# Altium footprint library Terminal_Blocks_Pluggable PCB_5.08mm.PcbLib: 299 footprints (part 10 of 19)
Each footprint in its own frame and in the unit in brackets; x right, y up, seen from the top. Pads: shape width x height; smd on the part's side, far side on the other; paste and mask are expansions set on the pad; w line width, h text height; cw(c..) or ccw(c..) is an arc to the next point about the centre after c.
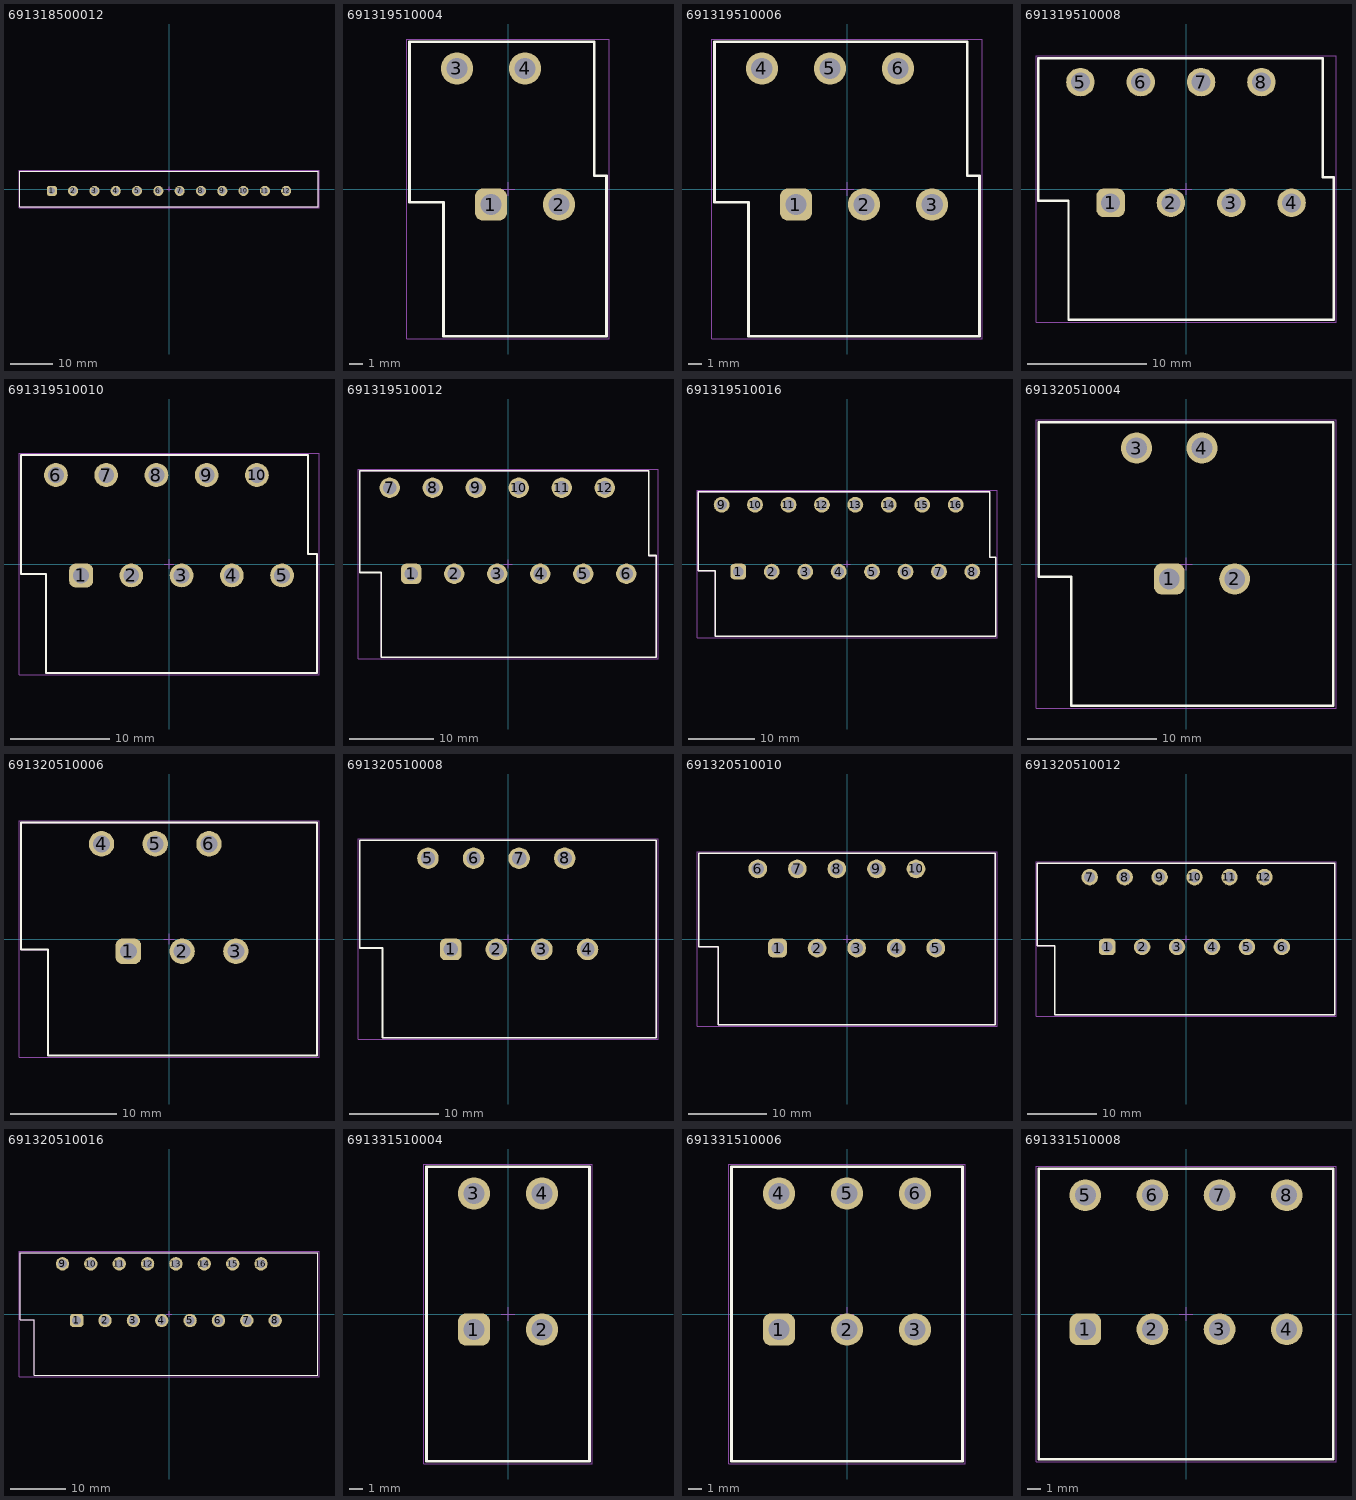
[diagram p9: the footprints below, top view; thin cyan lines are the x and y axes]

## 691318500012 [mm] "5,08mm - Closed Vertical PCB Header with Flanges - 12p"
height 12
pads (12):
  rrect50% 2.4x2.4 hole 1.6: 1(-27.94,-0.45)
  round 2.4 hole 1.6: 2(-22.86,-0.45) 3(-17.78,-0.45) 4(-12.7,-0.45) 5(-7.62,-0.45) 6(-2.54,-0.45) 7(2.54,-0.45) 8(7.62,-0.45) 9(12.7,-0.45) 10(17.78,-0.45) 11(22.86,-0.45) 12(27.94,-0.45)
Top Overlay:
  lines w0.2: -35.56,-4.25 -35.56,4.25 35.56,4.25 35.56,-4.25 -35.56,-4.25
Top Designator:
  text ".Designator" at -7.498,-0.5 h1.5
Top Component Outline:
  lines w0.1: -35.56,-4.25 35.56,-4.25 35.56,4.25 -35.56,4.25 -35.56,-4.25
Top 3D Body:
  lines w0.1: -35.56,-4.25 -35.56,4.25 35.56,4.25 35.56,-4.25 -35.56,-4.25
Top Courtyard:
  lines w0.05: -35.76,-4.45 -35.76,4.45 35.76,4.45 35.76,-4.45 -35.76,-4.45
Top Component Center:
  lines w0.05: -0.5,0 0.5,0 ; 0,-0.5 0,0.5
3D body "691318500012.stp": height 12.05, standoff -3.95, extent -35.56,-4.25 35.56,4.25

## 691319510004 [mm] "Double Level Horizontal Male PCB Header with closed Flanges, pitch 5.08mm, 04p"
height 23.7
pads (4):
  rrect50% 2.4x2.4 hole 1.6: 1(-1.27,-1.16)
  round 2.4 hole 1.6: 2(3.81,-1.16) 3(-3.81,9) 4(1.27,9)
Top Overlay:
  lines w0.2: -7.35,-1 -4.81,-1 -4.81,-11 7.35,-11 7.35,1 6.45,1 6.45,11 -7.35,11 -7.35,-1
Top Designator:
  text ".Designator" at -7.498,-0.5 h1.5
Top Component Outline:
  lines w0.1: -7.35,-1 -7.35,11 6.45,11 6.45,1 7.35,1 7.35,-11 -4.81,-11 -4.81,-1 -7.35,-1
Top 3D Body:
  lines w0.1: -7.35,-1 -4.81,-1 -4.81,-11 7.35,-11 7.35,1 6.45,1 6.45,11 -7.35,11 -7.35,-1
Top Courtyard:
  lines w0.05: -7.55,-11.2 -7.55,11.2 7.55,11.2 7.55,-11.2 -7.55,-11.2
Top Component Center:
  lines w0.05: -0.5,0 0.5,0 ; 0,-0.5 0,0.5
3D body "691319510004.stp": height 23.75, standoff -3.95, extent -7.35,-11 7.35,11

## 691319510006 [mm] "Double Level Horizontal Male PCB Header with closed Flanges, pitch 5.08mm, 06p"
height 23.7
pads (6):
  rrect50% 2.4x2.4 hole 1.6: 1(-3.81,-1.16)
  round 2.4 hole 1.6: 2(1.27,-1.16) 3(6.35,-1.16) 4(-6.35,9) 5(-1.27,9) 6(3.81,9)
Top Overlay:
  lines w0.2: -9.89,-1 -9.89,11 8.99,11 8.99,1 9.89,1 9.89,-11 -7.35,-11 -7.35,-1 -9.89,-1
Top Designator:
  text ".Designator" at -7.498,-0.5 h1.5
Top Component Outline:
  lines w0.1: -9.89,-1 -7.35,-1 -7.35,-11 9.89,-11 9.89,1 8.99,1 8.99,11 -9.89,11 -9.89,-1
Top 3D Body:
  lines w0.1: -9.89,-1 -9.89,11 8.99,11 8.99,1 9.89,1 9.89,-11 -7.35,-11 -7.35,-1 -9.89,-1
Top Courtyard:
  lines w0.05: -10.09,-11.2 10.09,-11.2 10.09,11.2 -10.09,11.2 -10.09,-11.2
Top Component Center:
  lines w0.05: -0.5,0 0.5,0 ; 0,-0.5 0,0.5
3D body "691319510006.stp": height 23.75, standoff -3.95, extent -9.89,-11 9.89,11

## 691319510008 [mm] "Double Level Horizontal Male PCB Header with closed Flanges, pitch 5.08mm, 08p"
height 23.7
pads (8):
  rrect50% 2.4x2.4 hole 1.6: 1(-6.35,-1.16)
  round 2.4 hole 1.6: 2(-1.27,-1.16) 3(3.81,-1.16) 4(8.89,-1.16) 5(-8.89,9) 6(-3.81,9) 7(1.27,9) 8(6.35,9)
Top Overlay:
  lines w0.2: -12.43,-1 -9.89,-1 -9.89,-11 12.43,-11 12.43,1 11.53,1 11.53,11 -12.43,11 -12.43,-1
Top Designator:
  text ".Designator" at -7.498,-0.5 h1.5
Top Component Outline:
  lines w0.1: -12.43,-1 -12.43,11 11.53,11 11.53,1 12.43,1 12.43,-11 -9.89,-11 -9.89,-1 -12.43,-1
Top 3D Body:
  lines w0.1: -12.43,-1 -9.89,-1 -9.89,-11 12.43,-11 12.43,1 11.53,1 11.53,11 -12.43,11 -12.43,-1
Top Courtyard:
  lines w0.05: -12.63,-11.2 -12.63,11.2 12.63,11.2 12.63,-11.2 -12.63,-11.2
Top Component Center:
  lines w0.05: -0.5,0 0.5,0 ; 0,-0.5 0,0.5
3D body "691319510008.stp": height 23.75, standoff -3.95, extent -12.43,-11 12.43,11

## 691319510010 [mm] "Double Level Horizontal Male PCB Header with closed Flanges, pitch 5.08mm, 10p"
height 23.7
pads (10):
  rrect50% 2.4x2.4 hole 1.6: 1(-8.89,-1.16)
  round 2.4 hole 1.6: 2(-3.81,-1.16) 3(1.27,-1.16) 4(6.35,-1.16) 5(11.43,-1.16) 6(-11.43,9) 7(-6.35,9) 8(-1.27,9) 9(3.81,9) 10(8.89,9)
Top Overlay:
  lines w0.2: -14.97,-1 -12.43,-1 -12.43,-11 14.97,-11 14.97,1 14.07,1 14.07,11 -14.97,11 -14.97,-1
Top Designator:
  text ".Designator" at -7.498,-0.5 h1.5
Top Component Outline:
  lines w0.1: -14.97,-1 -14.97,11 14.07,11 14.07,1 14.97,1 14.97,-11 -12.43,-11 -12.43,-1 -14.97,-1
Top 3D Body:
  lines w0.1: -14.97,-1 -12.43,-1 -12.43,-11 14.97,-11 14.97,1 14.07,1 14.07,11 -14.97,11 -14.97,-1
Top Courtyard:
  lines w0.05: -15.17,-11.2 -15.17,11.2 15.17,11.2 15.17,-11.2 -15.17,-11.2
Top Component Center:
  lines w0.05: -0.5,0 0.5,0 ; 0,-0.5 0,0.5
3D body "691319510010.stp": height 23.75, standoff -3.95, extent -14.97,-11 14.97,11

## 691319510012 [mm] "Double Level Horizontal Male PCB Header with closed Flanges, pitch 5.08mm, 12p"
height 23.7
pads (12):
  rrect50% 2.4x2.4 hole 1.6: 1(-11.43,-1.16)
  round 2.4 hole 1.6: 2(-6.35,-1.16) 3(-1.27,-1.16) 4(3.81,-1.16) 5(8.89,-1.16) 6(13.97,-1.16) 7(-13.97,9) 8(-8.89,9) 9(-3.81,9) 10(1.27,9) 11(6.35,9) 12(11.43,9)
Top Overlay:
  lines w0.2: -17.51,-1 -17.51,11 16.61,11 16.61,1 17.51,1 17.51,-11 -14.97,-11 -14.97,-1 -17.51,-1
Top Designator:
  text ".Designator" at -7.498,-0.5 h1.5
Top Component Outline:
  lines w0.1: -17.51,-1 -14.97,-1 -14.97,-11 17.51,-11 17.51,1 16.61,1 16.61,11 -17.51,11 -17.51,-1
Top 3D Body:
  lines w0.1: -17.51,-1 -17.51,11 16.61,11 16.61,1 17.51,1 17.51,-11 -14.97,-11 -14.97,-1 -17.51,-1
Top Courtyard:
  lines w0.05: -17.71,-11.2 17.71,-11.2 17.71,11.2 -17.71,11.2 -17.71,-11.2
Top Component Center:
  lines w0.05: -0.5,0 0.5,0 ; 0,-0.5 0,0.5
3D body "691319510012.stp": height 23.75, standoff -3.95, extent -17.51,-11 17.51,11

## 691319510016 [mm] "Double Level Horizontal Male PCB Header with closed Flanges, pitch 5.08mm, 16p"
height 23.7
pads (16):
  rrect50% 2.4x2.4 hole 1.6: 1(-16.51,-1.16)
  round 2.4 hole 1.6: 2(-11.43,-1.16) 3(-6.35,-1.16) 4(-1.27,-1.16) 5(3.81,-1.16) 6(8.89,-1.16) 7(13.97,-1.16) 8(19.05,-1.16) 9(-19.05,9) 10(-13.97,9) 11(-8.89,9) 12(-3.81,9) 13(1.27,9) 14(6.35,9) 15(11.43,9) 16(16.51,9)
Top Overlay:
  lines w0.2: -22.59,-1 -22.59,11 21.69,11 21.69,1 22.59,1 22.59,-11 -20.05,-11 -20.05,-1 -22.59,-1
Top Designator:
  text ".Designator" at -7.498,-0.5 h1.5
Top Component Outline:
  lines w0.1: -22.59,-1 -20.05,-1 -20.05,-11 22.59,-11 22.59,1 21.69,1 21.69,11 -22.59,11 -22.59,-1
Top 3D Body:
  lines w0.1: -22.59,-1 -22.59,11 21.69,11 21.69,1 22.59,1 22.59,-11 -20.05,-11 -20.05,-1 -22.59,-1
Top Courtyard:
  lines w0.05: -22.79,-11.2 22.79,-11.2 22.79,11.2 -22.79,11.2 -22.79,-11.2
Top Component Center:
  lines w0.05: -0.5,0 0.5,0 ; 0,-0.5 0,0.5
3D body "691319510016.stp": height 23.75, standoff -3.95, extent -22.59,-11 22.59,11

## 691320510004 [mm] "Double Level Horizontal Male PCB Header with closed Flanges & Nut Type, pitch 5.08mm, 04p"
height 23.7
pads (4):
  rrect50% 2.4x2.4 hole 1.6: 1(-1.3,-1.16)
  round 2.4 hole 1.6: 2(3.78,-1.16) 3(-3.84,9) 4(1.24,9)
Top Overlay:
  lines w0.2: -11.44,-1 -11.44,11 11.44,11 11.44,-11 -8.9,-11 -8.9,-1 -11.44,-1
Top Designator:
  text ".Designator" at -7.498,-0.5 h1.5
Top Component Outline:
  lines w0.1: -11.44,-1 -8.9,-1 -8.9,-11 11.44,-11 11.44,11 -11.44,11 -11.44,-1
Top 3D Body:
  lines w0.1: -11.44,-1 -11.44,11 11.44,11 11.44,-11 -8.9,-11 -8.9,-1 -11.44,-1
Top Courtyard:
  lines w0.05: -11.64,-11.2 -11.64,11.2 11.64,11.2 11.64,-11.2 -11.64,-11.2
Top Component Center:
  lines w0.05: -0.5,0 0.5,0 ; 0,-0.5 0,0.5
3D body "691320510004.stp": height 23.74, standoff -3.96, extent -11.46,-11 11.4,11

## 691320510006 [mm] "Double Level Horizontal Male PCB Header with closed Flanges & Nut Type, pitch 5.08mm, 06p"
height 23.7
pads (6):
  rrect50% 2.4x2.4 hole 1.6: 1(-3.84,-1.16)
  round 2.4 hole 1.6: 2(1.24,-1.16) 3(6.32,-1.16) 4(-6.38,9) 5(-1.3,9) 6(3.78,9)
Top Overlay:
  lines w0.2: -13.98,-1 -11.44,-1 -11.44,-11 13.98,-11 13.98,11 -13.98,11 -13.98,-1
Top Designator:
  text ".Designator" at -7.498,-0.5 h1.5
Top Component Outline:
  lines w0.1: -13.98,-1 -13.98,11 13.98,11 13.98,-11 -11.44,-11 -11.44,-1 -13.98,-1
Top 3D Body:
  lines w0.1: -13.98,-1 -11.44,-1 -11.44,-11 13.98,-11 13.98,11 -13.98,11 -13.98,-1
Top Courtyard:
  lines w0.05: -14.18,-11.2 14.18,-11.2 14.18,11.2 -14.18,11.2 -14.18,-11.2
Top Component Center:
  lines w0.05: -0.5,0 0.5,0 ; 0,-0.5 0,0.5
3D body "691320510006.stp": height 23.74, standoff -3.96, extent -13.97,-11 13.97,11

## 691320510008 [mm] "Double Level Horizontal Male PCB Header with closed Flanges & Nut Type, pitch 5.08mm, 08p"
height 23.7
pads (8):
  rrect50% 2.4x2.4 hole 1.6: 1(-6.38,-1.16)
  round 2.4 hole 1.6: 2(-1.3,-1.16) 3(3.78,-1.16) 4(8.86,-1.16) 5(-8.92,9) 6(-3.84,9) 7(1.24,9) 8(6.32,9)
Top Overlay:
  lines w0.2: -16.52,-1 -13.98,-1 -13.98,-11 16.52,-11 16.52,11 -16.52,11 -16.52,-1
Top Designator:
  text ".Designator" at -7.498,-0.5 h1.5
Top Component Outline:
  lines w0.1: -16.52,-1 -16.52,11 16.52,11 16.52,-11 -13.98,-11 -13.98,-1 -16.52,-1
Top 3D Body:
  lines w0.1: -16.52,-1 -13.98,-1 -13.98,-11 16.52,-11 16.52,11 -16.52,11 -16.52,-1
Top Courtyard:
  lines w0.05: -16.72,-11.2 16.72,-11.2 16.72,11.2 -16.72,11.2 -16.72,-11.2
Top Component Center:
  lines w0.05: -0.5,0 0.5,0 ; 0,-0.5 0,0.5
3D body "691320510008.stp": height 23.74, standoff -3.96, extent -16.51,-11 16.51,11

## 691320510010 [mm] "Double Level Horizontal Male PCB Header with closed Flanges & Nut Type, pitch 5.08mm, 10p"
height 23.7
pads (10):
  rrect50% 2.4x2.4 hole 1.6: 1(-8.92,-1.16)
  round 2.4 hole 1.6: 2(-3.84,-1.16) 3(1.24,-1.16) 4(6.32,-1.16) 5(11.4,-1.16) 6(-11.46,9) 7(-6.38,9) 8(-1.3,9) 9(3.78,9) 10(8.86,9)
Top Overlay:
  lines w0.2: -19.06,-1 -16.52,-1 -16.52,-11 19.06,-11 19.06,11 -19.06,11 -19.06,-1
Top Designator:
  text ".Designator" at -7.498,-0.5 h1.5
Top Component Outline:
  lines w0.1: -19.06,-1 -19.06,11 19.06,11 19.06,-11 -16.52,-11 -16.52,-1 -19.06,-1
Top 3D Body:
  lines w0.1: -19.06,-1 -16.52,-1 -16.52,-11 19.06,-11 19.06,11 -19.06,11 -19.06,-1
Top Courtyard:
  lines w0.05: -19.26,-11.2 19.26,-11.2 19.26,11.2 -19.26,11.2 -19.26,-11.2
Top Component Center:
  lines w0.05: -0.5,0 0.5,0 ; 0,-0.5 0,0.5
3D body "691320510010.stp": height 23.74, standoff -3.96, extent -19.05,-11 19.05,11

## 691320510012 [mm] "Double Level Horizontal Male PCB Header with closed Flanges & Nut Type, pitch 5.08mm, 12p"
height 23.7
pads (12):
  rrect50% 2.4x2.4 hole 1.6: 1(-11.46,-1.16)
  round 2.4 hole 1.6: 2(-6.38,-1.16) 3(-1.3,-1.16) 4(3.78,-1.16) 5(8.86,-1.16) 6(13.94,-1.16) 7(-14,9) 8(-8.92,9) 9(-3.84,9) 10(1.24,9) 11(6.32,9) 12(11.4,9)
Top Overlay:
  lines w0.2: -21.6,-1 -21.6,11 21.6,11 21.6,-11 -19.06,-11 -19.06,-1 -21.6,-1
Top Designator:
  text ".Designator" at -7.498,-0.5 h1.5
Top Component Outline:
  lines w0.1: -21.6,-1 -19.06,-1 -19.06,-11 21.6,-11 21.6,11 -21.6,11 -21.6,-1
Top 3D Body:
  lines w0.1: -21.6,-1 -21.6,11 21.6,11 21.6,-11 -19.06,-11 -19.06,-1 -21.6,-1
Top Courtyard:
  lines w0.05: -21.8,-11.2 -21.8,11.2 21.8,11.2 21.8,-11.2 -21.8,-11.2
Top Component Center:
  lines w0.05: -0.5,0 0.5,0 ; 0,-0.5 0,0.5
3D body "691320510012.stp": height 23.74, standoff -3.96, extent -21.59,-11 21.59,11

## 691320510016 [mm] "Double Level Horizontal Male PCB Header with closed Flanges & Nut Type, pitch 5.08mm, 16p"
height 23.7
pads (16):
  rrect50% 2.4x2.4 hole 1.6: 1(-16.54,-1.16)
  round 2.4 hole 1.6: 2(-11.46,-1.16) 3(-6.38,-1.16) 4(-1.3,-1.16) 5(3.78,-1.16) 6(8.86,-1.16) 7(13.94,-1.16) 8(19.02,-1.16) 9(-19.08,9) 10(-14,9) 11(-8.92,9) 12(-3.84,9) 13(1.24,9) 14(6.32,9) 15(11.4,9) 16(16.48,9)
Top Overlay:
  lines w0.2: -26.68,-1 -24.14,-1 -24.14,-11 26.68,-11 26.68,11 -26.68,11 -26.68,-1
Top Designator:
  text ".Designator" at -7.498,-0.5 h1.5
Top Component Outline:
  lines w0.1: -26.68,-1 -26.68,11 26.68,11 26.68,-11 -24.14,-11 -24.14,-1 -26.68,-1
Top 3D Body:
  lines w0.1: -26.68,-1 -24.14,-1 -24.14,-11 26.68,-11 26.68,11 -26.68,11 -26.68,-1
Top Courtyard:
  lines w0.05: -26.88,-11.2 26.88,-11.2 26.88,11.2 -26.88,11.2 -26.88,-11.2
Top Component Center:
  lines w0.05: -0.5,0 0.5,0 ; 0,-0.5 0,0.5
3D body "691320510016.stp": height 23.74, standoff -3.96, extent -26.67,-11 26.67,11

## 691331510004 [mm] "5,08mm - PCB - Dual row - Horizontal - 04p"
height 28.8
pads (4):
  rrect50% 2.4x2.4 hole 1.6: 1(-2.54,-1.16)
  round 2.4 hole 1.6: 2(2.54,-1.16) 3(-2.54,9) 4(2.54,9)
Top Overlay:
  lines w0.2: -6.08,-11 6.08,-11 6.08,11 -6.08,11 -6.08,-11
Top Designator:
  text ".Designator" at -7.498,-0.5 h1.5
Top Component Outline:
  lines w0.1: -6.08,-11 -6.08,11 6.08,11 6.08,-11 -6.08,-11
Top 3D Body:
  lines w0.1: -6.08,-11 6.08,-11 6.08,11 -6.08,11 -6.08,-11
Top Courtyard:
  lines w0.05: -6.28,-11.2 -6.28,11.2 6.28,11.2 6.28,-11.2 -6.28,-11.2
Top Component Center:
  lines w0.05: -0.5,0 0.5,0 ; 0,-0.5 0,0.5
3D body "691331510004.stp": height 28.85, standoff -3.95, extent -6.08,-11 6.08,11

## 691331510006 [mm] "5,08mm - PCB - Dual row - Horizontal - 06p"
height 28.8
pads (6):
  rrect50% 2.4x2.4 hole 1.6: 1(-5.08,-1.16)
  round 2.4 hole 1.6: 2(0,-1.16) 3(5.08,-1.16) 4(-5.08,9) 5(0,9) 6(5.08,9)
Top Overlay:
  lines w0.2: -8.62,-11 8.62,-11 8.62,11 -8.62,11 -8.62,-11
Top Designator:
  text ".Designator" at -7.498,-0.5 h1.5
Top Component Outline:
  lines w0.1: -8.62,-11 -8.62,11 8.62,11 8.62,-11 -8.62,-11
Top 3D Body:
  lines w0.1: -8.62,-11 8.62,-11 8.62,11 -8.62,11 -8.62,-11
Top Courtyard:
  lines w0.05: -8.82,-11.2 -8.82,11.2 8.82,11.2 8.82,-11.2 -8.82,-11.2
Top Component Center:
  lines w0.05: -0.5,0 0.5,0 ; 0,-0.5 0,0.5
3D body "691331510006.stp": height 28.85, standoff -3.95, extent -8.62,-11 8.62,11

## 691331510008 [mm] "5,08mm - PCB - Dual row - Horizontal - 08p"
height 28.8
pads (8):
  rrect50% 2.4x2.4 hole 1.6: 1(-7.62,-1.16)
  round 2.4 hole 1.6: 2(-2.54,-1.16) 3(2.54,-1.16) 4(7.62,-1.16) 5(-7.62,9) 6(-2.54,9) 7(2.54,9) 8(7.62,9)
Top Overlay:
  lines w0.2: -11.16,-11 -11.16,11 11.16,11 11.16,-11 -11.16,-11
Top Designator:
  text ".Designator" at -7.498,-0.5 h1.5
Top Component Outline:
  lines w0.1: -11.16,-11 11.16,-11 11.16,11 -11.16,11 -11.16,-11
Top 3D Body:
  lines w0.1: -11.16,-11 -11.16,11 11.16,11 11.16,-11 -11.16,-11
Top Courtyard:
  lines w0.05: -11.36,-11.2 11.36,-11.2 11.36,11.2 -11.36,11.2 -11.36,-11.2
Top Component Center:
  lines w0.05: -0.5,0 0.5,0 ; 0,-0.5 0,0.5
3D body "691331510008.stp": height 28.85, standoff -3.95, extent -11.16,-11 11.16,11